# Altium footprint library FootPrintLib_1.PcbLib: 498 footprints (part 32 of 35)
Each footprint in its own frame and in the unit in brackets; x right, y up, seen from the top. Pads: shape width x height; smd on the part's side, far side on the other; paste and mask are expansions set on the pad; w line width, h text height; cw(c..) or ccw(c..) is an arc to the next point about the centre after c.
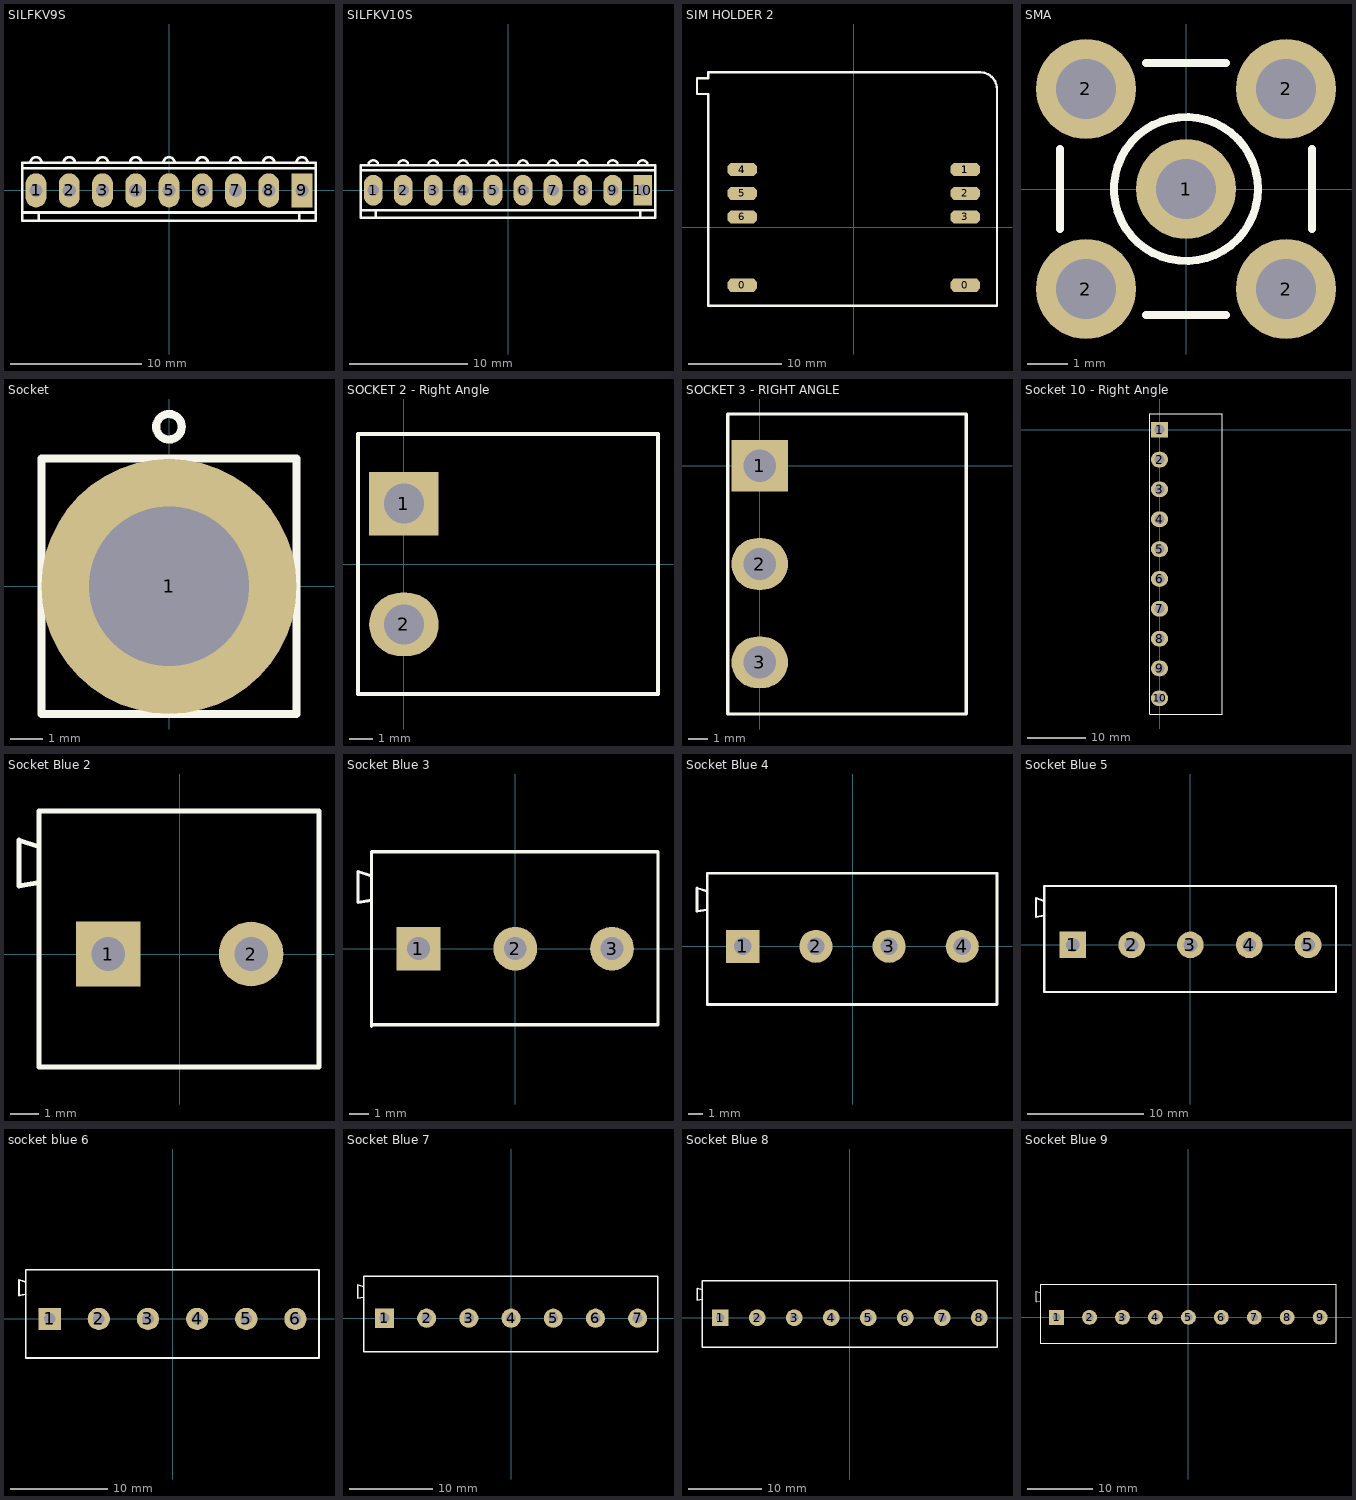
[diagram p31: the footprints below, top view; thin cyan lines are the x and y axes]

## SILFKV9S [mm]
pads (9):
  oval 1.6x2.6 hole 1: 1(-10.16,0) 2(-7.62,0) 3(-5.08,0) 4(-2.54,0) 5(0,0) 6(2.54,0) 7(5.08,0) 8(7.62,0)
  rect 1.6x2.6 hole 1: 9(10.16,0)
Top Overlay:
  lines w0.203: -11.218,-1.693 11.218,-1.693 ; -11.218,1.693 -10.583,1.693 ; -10.583,2.117 cw(c-10.16,2.117) -9.737,2.117 ; -10.575,1.685 11.218,1.693 ; -9.948,-2.328 -9.948,-1.693 ; -8.043,2.117 cw(c-7.62,2.117) -7.197,2.117 ; -5.503,2.117 cw(c-5.08,2.117) -4.657,2.117 ; -2.963,2.117 cw(c-2.54,2.117) -2.117,2.117 ; -0.423,2.117 cw(c0,2.117) 0.423,2.117 ; 2.117,2.117 cw(c2.54,2.117) 2.963,2.117 ; 4.657,2.117 cw(c5.08,2.117) 5.503,2.117 ; 7.197,2.117 cw(c7.62,2.117) 8.043,2.117 ; 9.737,2.117 cw(c10.16,2.117) 10.583,2.117 ; 9.948,-2.328 9.948,-1.693 ; -11.218,-2.328 11.218,-2.328 11.218,2.117 -11.218,2.117 -11.218,-2.328

## SILFKV10S [mm]
pads (10):
  oval 1.6x2.6 hole 1: 1(-11.43,0) 2(-8.89,0) 3(-6.35,0) 4(-3.81,0) 5(-1.27,0) 6(1.27,0) 7(3.81,0) 8(6.35,0) 9(8.89,0)
  rect 1.6x2.6 hole 1: 10(11.43,0)
Top Overlay:
  lines w0.203: -12.488,-1.693 12.488,-1.693 ; -12.488,1.693 -12.065,1.693 ; -12.057,1.685 12.488,1.693 ; -11.853,2.117 cw(c-11.43,2.117) -11.007,2.117 ; -11.218,-2.328 -11.218,-1.693 ; -9.313,2.117 cw(c-8.89,2.117) -8.467,2.117 ; -6.773,2.117 cw(c-6.35,2.117) -5.927,2.117 ; -4.233,2.117 cw(c-3.81,2.117) -3.387,2.117 ; -1.693,2.117 cw(c-1.27,2.117) -0.847,2.117 ; 0.847,2.117 cw(c1.27,2.117) 1.693,2.117 ; 3.387,2.117 cw(c3.81,2.117) 4.233,2.117 ; 5.927,2.117 cw(c6.35,2.117) 6.773,2.117 ; 8.467,2.117 cw(c8.89,2.117) 9.313,2.117 ; 11.007,2.117 cw(c11.43,2.117) 11.853,2.117 ; 11.218,-2.328 11.218,-1.693 ; -12.488,-2.328 12.488,-2.328 12.488,2.117 -12.488,2.117 -12.488,-2.328

## SIM HOLDER 2 [mm]
pads (10):
  oct 3.2x1.4 smd: 0(-11.954,-6.2) 0(11.954,-6.2) 1(11.954,6.2) 1(11.954,6.2) 2(11.954,3.66) 3(11.954,1.12) 4(-11.954,6.2) 4(-11.954,6.2) 5(-11.954,3.66) 6(-11.954,1.12)
Top Overlay:
  lines w0.254: -15.634,14.304 -16.802,14.304 -16.802,15.981 -15.583,15.981 -15.583,16.619 13.573,16.619 cw(c13.573,14.832) 15.36,14.832 15.36,-8.381 -15.583,-8.381 -15.583,14.304
3D body "912283001.stp": height 3.1, standoff 0, extent -16.84,-8.381 15.36,16.619

## SMA [mm]
pads (5):
  round 2.5 hole 1.5: 1(0,0) 2(-2.5,-2.5) 2(-2.5,2.5) 2(2.5,-2.5) 2(2.5,2.5)
Top Overlay:
  circle w0.2: c0,0 r1.8
  lines w0.2: -3.15,-1 -3.15,1 ; -1,-3.15 1,-3.15 ; -1,3.15 1,3.15 ; 3.15,-1 3.15,1
Mechanical 1:
  circle w0.025: c0,0 r1.8
  circle w0.025: c0,0 r1.05
  circle w0.025: c0,0 r0.2
3D body "r125680000.stp": height 9.65, standoff -3.88, extent -3.175,-11.695 3.155,3.11

## Socket [mm]
pads (1):
  round 8 hole 5: 1(0,0)
Top Overlay:
  circle w0.254: c0,5 r0.4
  lines w0.254: -4,-4 4,-4 4,4 -4,4 -4,-4
3D body "New Socket-Short.STEP": height 26.7, standoff -4.75, extent -7.075,-7.075 7.075,7.075

## SOCKET 2 - Right Angle [mil]
pads (2):
  rect 115x105 hole 66: 1(0,100)
  oval 115x105 hole 66: 2(0,-100)
Top Overlay:
  lines w7: -76,-215 -76,215 420,215 420,-215 -76,-215
3D body "Socket Green_V2009.STEP": height 310, standoff -121.87, extent -60,-199.39 410,207.5

## SOCKET 3 - RIGHT ANGLE [mil]
pads (3):
  rect 115x105 hole 66: 1(0,0)
  oval 115x105 hole 66: 2(0,-200) 3(0,-400)
Top Overlay:
  lines w7: -65,-505 420,-505 420,105 -65,105 -65,-505
3D body "Socket Green_3Pin.STEP": height 310, standoff -161.24, extent -55,-505 415,105

## Socket 10 - Right Angle [mil]
pads (10):
  rect 115x105 hole 66: 1(0,0)
  oval 115x105 hole 66: 2(0,-200) 3(0,-400) 4(0,-600) 5(0,-800) 6(0,-1000) 7(0,-1200) 8(0,-1400) 9(0,-1600) 10(0,-1800)
Top Overlay:
  lines w7: -65,-1905 420,-1905 420,105 -65,105 -65,-1905
3D body "Socket Green_10Pin.STEP": height 310, standoff -161.24, extent -55,-1905 415,105

## Socket Blue 2 [mm]
pads (2):
  rect 2.3x2.3 hole 1.2: 1(-2.54,0)
  round 2.3 hole 1.2: 2(2.54,0)
Top Overlay:
  lines w0.178: -5.004,2.54 -5.715,2.421 -5.715,4.047 -5.004,3.81 ; -5.004,-4.013 4.953,-4.013 4.953,5.08 -5.004,5.08 -5.004,-4.013
3D body "Socket Blue_2Pin.STEP": height 12.52, standoff -6.68, extent -5.777,-3.988 4.965,5.08

## Socket Blue 3 [mm]
pads (3):
  rect 2.3x2.3 hole 1.2: 1(-5.08,0)
  round 2.3 hole 1.2: 2(0,0) 3(5.08,0)
Top Overlay:
  lines w0.178: -7.544,2.54 -8.255,2.421 -8.255,4.047 -7.544,3.81 ; -7.544,-4.064 -7.544,5.08 7.494,5.08 7.494,-3.999 -7.544,-3.999 -7.544,-4.064
3D body "Socket Blue_3Pin.STEP": height 12.78, standoff -6.43, extent -8.328,-3.999 7.494,5.069

## Socket Blue 4 [mm]
pads (4):
  rect 2.3x2.3 hole 1.2: 1(-7.62,0)
  round 2.3 hole 1.2: 2(-2.54,0) 3(2.54,0) 4(7.62,0)
Top Overlay:
  lines w0.178: -10.084,2.54 -10.795,2.421 -10.795,4.047 -10.084,3.81 ; -10.084,-4.064 -10.084,-4.039 ; -10.084,-4.064 -10.084,-4.013 -10.084,-4.039 ; -10.084,-4.064 -10.084,5.08 10.031,5.08 10.031,-4.039 -10.084,-4.039
3D body "Socket Blue_4Pin.STEP": height 12.52, standoff -6.68, extent -10.871,-4.039 10.031,5.029

## Socket Blue 5 [mm]
pads (5):
  rect 2.3x2.3 hole 1.2: 1(-10.16,0)
  round 2.3 hole 1.2: 2(-5.08,0) 3(0,0) 4(5.08,0) 5(10.16,0)
Top Overlay:
  lines w0.178: -12.624,2.54 -13.335,2.421 -13.335,4.047 -12.624,3.81 ; -12.624,-4.064 -12.624,5.08 12.573,5.08 12.573,-4.064 -12.624,-4.064
3D body "Socket Blue_5Pin.STEP": height 12.52, standoff -6.68, extent -13.335,-4.026 12.647,5.042

## socket blue 6 [mm]
pads (6):
  rect 2.3x2.3 hole 1.2: 1(-12.7,0)
  round 2.3 hole 1.2: 2(-7.62,0) 3(-2.54,0) 4(2.54,0) 5(7.62,0) 6(12.7,0)
Top Overlay:
  lines w0.178: -15.164,-4.013 -15.164,-4.064 ; -15.164,2.54 -15.875,2.421 -15.875,4.047 -15.164,3.81 ; -15.164,-4.064 -15.164,-4.039 15.138,-4.039 15.138,5.08 -15.164,5.08 -15.164,-4.064
3D body "Socket Blue_6Pin.STEP": height 12.52, standoff -6.68, extent -15.924,-4.039 15.138,5.029

## Socket Blue 7 [mm]
pads (7):
  rect 2.3x2.3 hole 1.2: 1(-15.24,0)
  round 2.3 hole 1.2: 2(-10.16,0) 3(-5.08,0) 4(0,0) 5(5.08,0) 6(10.16,0) 7(15.24,0)
Top Overlay:
  lines w0.178: -17.704,-4.064 -17.704,5.08 17.685,5.08 17.685,-4.042 -17.704,-4.042 ; -17.704,2.54 -18.415,2.421 -18.415,4.047 -17.704,3.81
3D body "Socket Blue_7Pin.STEP": height 12.52, standoff -6.68, extent -18.457,-4.042 17.685,5.025

## Socket Blue 8 [mm]
pads (8):
  rect 2.3x2.3 hole 1.2: 1(-17.78,0)
  round 2.3 hole 1.2: 2(-12.7,0) 3(-7.62,0) 4(-2.54,0) 5(2.54,0) 6(7.62,0) 7(12.7,0) 8(17.78,0)
Top Overlay:
  lines w0.178: -20.244,-4.051 20.216,-4.051 20.216,5.08 -20.244,5.08 -20.244,-4.064 -20.244,-4.013 ; -20.244,2.54 -20.955,2.421 -20.955,4.047 -20.244,3.81
3D body "Socket Blue_8Pin.STEP": height 12.52, standoff -6.68, extent -21.006,-4.051 20.216,5.016

## Socket Blue 9 [mm]
pads (9):
  rect 2.3x2.3 hole 1.2: 1(-20.32,0)
  round 2.3 hole 1.2: 2(-15.24,0) 3(-10.16,0) 4(-5.08,0) 5(0,0) 6(5.08,0) 7(10.16,0) 8(15.24,0) 9(20.32,0)
Top Overlay:
  lines w0.178: -22.784,2.54 -23.495,2.421 -23.495,4.047 -22.784,3.81 ; -22.784,-4.064 -22.784,5.08 22.758,5.08 22.758,-4.013 -22.784,-4.013 -22.784,-4.064
3D body "Socket Blue_9Pin.STEP": height 12.52, standoff -6.68, extent -23.544,-4.013 22.758,5.055